# Altium footprint library WR-BHD.PcbLib: 220 footprints (part 5 of 14)
Each footprint in its own frame and in the unit in brackets; x right, y up, seen from the top. Pads: shape width x height; smd on the part's side, far side on the other; paste and mask are expansions set on the pad; w line width, h text height; cw(c..) or ccw(c..) is an arc to the next point about the centre after c.
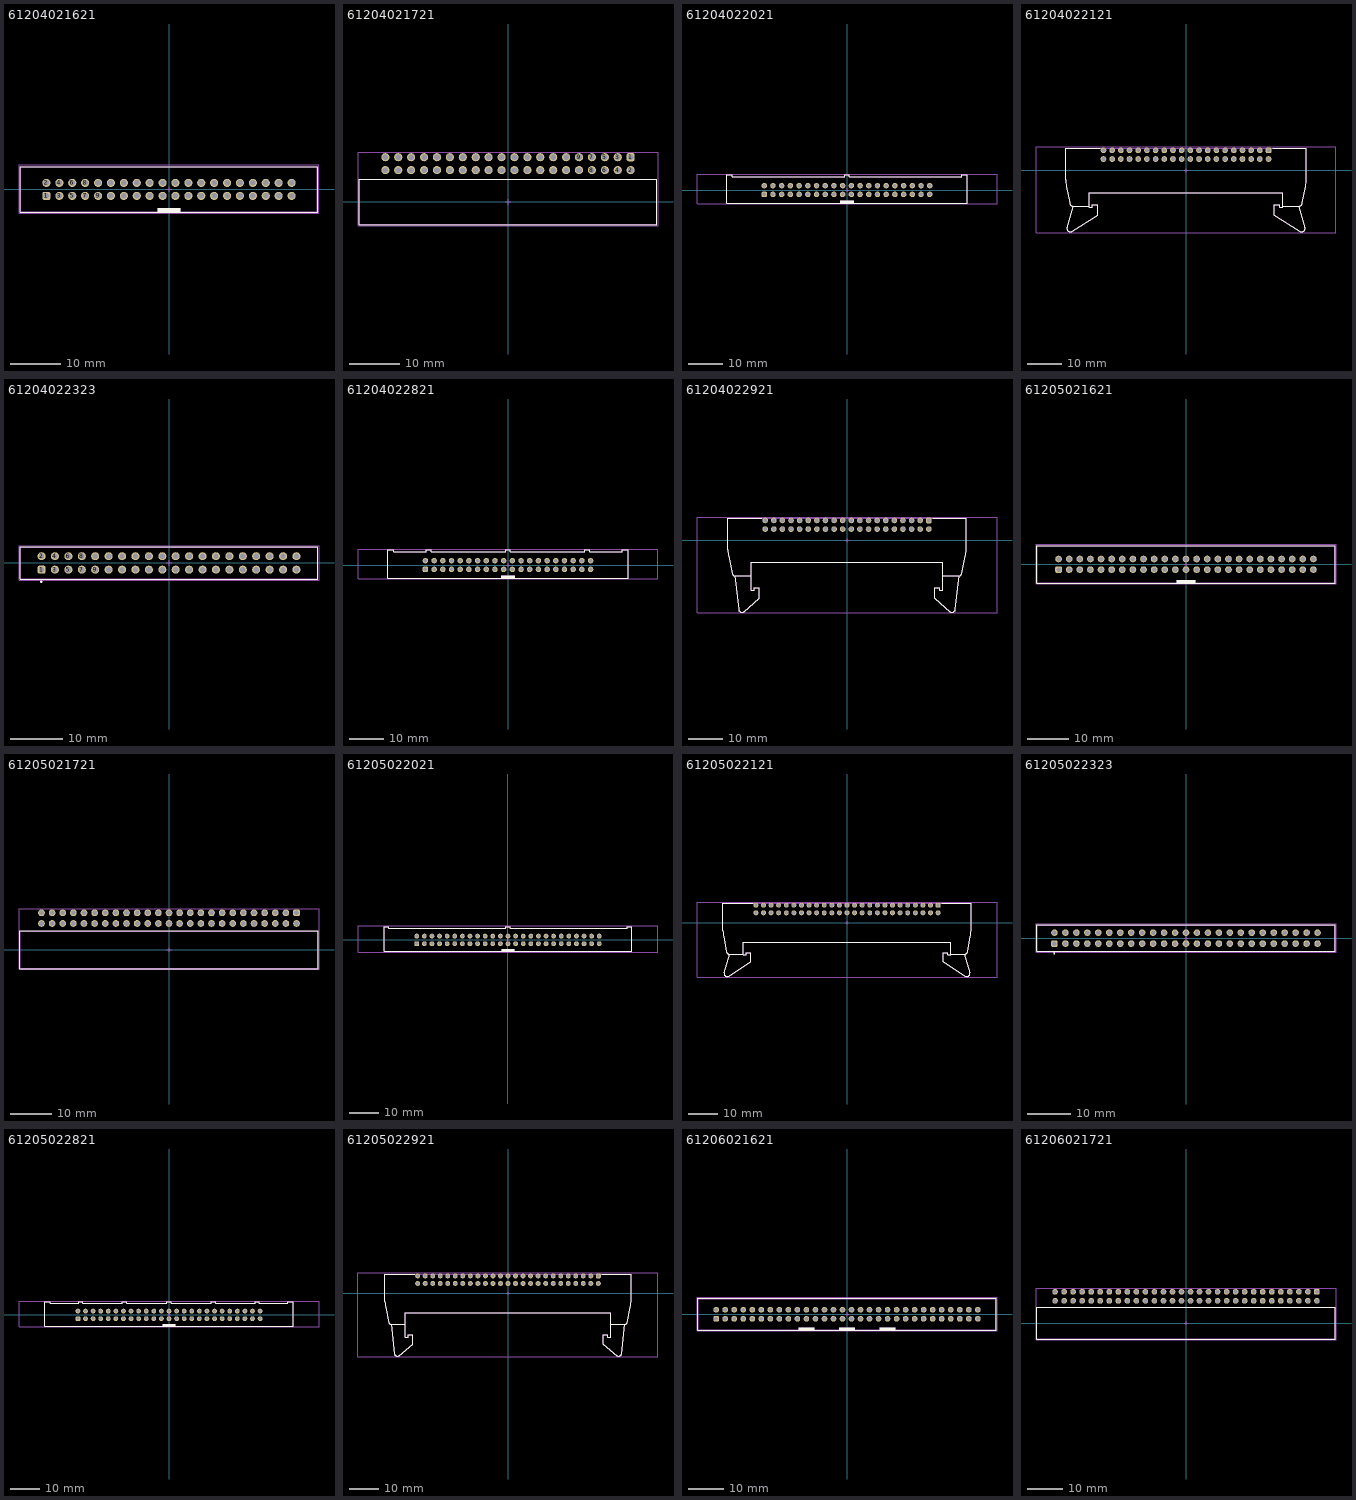
[diagram p4: the footprints below, top view; thin cyan lines are the x and y axes]

## 61204021621 [mm] "40 pins, straight, gold plating"
height 9.1
pads (40):
  rrect50% 1.6x1.6 hole 1.1: 1(-24.13,-1.27)
  round 1.6 hole 1.1: 2(-24.13,1.27) 3(-21.59,-1.27) 4(-21.59,1.27) 5(-19.05,-1.27) 6(-19.05,1.27) 7(-16.51,-1.27) 8(-16.51,1.27) 9(-13.97,-1.27) 10(-13.97,1.27) 11(-11.43,-1.27) 12(-11.43,1.27) 13(-8.89,-1.27) 14(-8.89,1.27) 15(-6.35,-1.27) 16(-6.35,1.27) 17(-3.81,-1.27) 18(-3.81,1.27) 19(-1.27,-1.27) 20(-1.27,1.27) 21(1.27,-1.27) 22(1.27,1.27) 23(3.81,-1.27) 24(3.81,1.27) 25(6.35,-1.27) 26(6.35,1.27) 27(8.89,-1.27) 28(8.89,1.27) 29(11.43,-1.27) 30(11.43,1.27) 31(13.97,-1.27) 32(13.97,1.27) 33(16.51,-1.27) 34(16.51,1.27) 35(19.05,-1.27) 36(19.05,1.27) 37(21.59,-1.27) 38(21.59,1.27) 39(24.13,-1.27) 40(24.13,1.27)
Top Overlay:
  rectangle: -2.25,-4.5 2.25,-3.7
  lines w0.2: -29.33,-4.5 -29.33,4.5 29.33,4.5 29.33,-4.5 -29.33,-4.5
Top Assembly:
  rectangle: -2.25,-4.425 2.25,-3.7
  lines w0.1: -29.23,-4.425 29.23,-4.425 29.23,4.425 -29.23,4.425 -29.23,-4.425
Top Designator:
  text ".Designator" at -3.647,-0.357 h1
Top 3D Body:
  rectangle: -2.25,-4.425 2.25,-3.7
  lines w0.1: -29.23,-4.425 -29.23,4.425 29.23,4.425 29.23,-4.425 -29.23,-4.425
Top Courtyard:
  lines w0.05: -29.53,-4.7 -29.53,4.85 29.53,4.85 29.53,-4.7 -29.53,-4.7
Top Component Center:
  lines w0.1: -0.5,0 0.5,0 ; 0,-0.5 0,0.5
3D body "61204021621.stp": height 9.13, standoff -2.98, extent -29.23,-4.425 29.23,4.75

## 61204021721 [mm] "40 pins, right angled, gold plating"
height 9.1
pads (40):
  rrect50% 1.6x1.6 hole 1.1: 1(24.13,8.805)
  round 1.6 hole 1.1: 2(24.13,6.265) 3(21.59,8.805) 4(21.59,6.265) 5(19.05,8.805) 6(19.05,6.265) 7(16.51,8.805) 8(16.51,6.265) 9(13.97,8.805) 10(13.97,6.265) 11(11.43,8.805) 12(11.43,6.265) 13(8.89,8.805) 14(8.89,6.265) 15(6.35,8.805) 16(6.35,6.265) 17(3.81,8.805) 18(3.81,6.265) 19(1.27,8.805) 20(1.27,6.265) 21(-1.27,8.805) 22(-1.27,6.265) 23(-3.81,8.805) 24(-3.81,6.265) 25(-6.35,8.805) 26(-6.35,6.265) 27(-8.89,8.805) 28(-8.89,6.265) 29(-11.43,8.805) 30(-11.43,6.265) 31(-13.97,8.805) 32(-13.97,6.265) 33(-16.51,8.805) 34(-16.51,6.265) 35(-19.05,8.805) 36(-19.05,6.265) 37(-21.59,8.805) 38(-21.59,6.265) 39(-24.13,8.805) 40(-24.13,6.265)
Top Overlay:
  lines w0.2: -29.305,-4.5 -29.305,4.5 29.305,4.5 29.305,-4.5 -29.305,-4.5
Top Assembly:
  lines w0.1: -29.23,-4.425 -29.23,4.425 29.23,4.425 29.23,-4.425 -29.23,-4.425
Top Designator:
  text ".Designator" at -3.647,-0.357 h1
Top 3D Body:
  lines w0.1: -29.23,-4.425 29.23,-4.425 29.23,4.425 -29.23,4.425 -29.23,-4.425
Top Courtyard:
  lines w0.05: -29.505,-4.7 29.505,-4.7 29.505,9.805 -29.505,9.805 -29.505,-4.7
Top Component Center:
  lines w0.1: -0.5,0 0.5,0 ; 0,-0.5 0,0.5
3D body "61204021721.stp": height 9.23, standoff -2.88, extent -29.23,-4.425 29.23,9.125

## 61204022021 [mm] "40 pins, straight, short lever, gold plating"
height 24.5
pads (40):
  rrect50% 1.6x1.6 hole 1.02: 1(-24.13,-1.27)
  round 1.6 hole 1.02: 2(-24.13,1.27) 3(-21.59,-1.27) 4(-21.59,1.27) 5(-19.05,-1.27) 6(-19.05,1.27) 7(-16.51,-1.27) 8(-16.51,1.27) 9(-13.97,-1.27) 10(-13.97,1.27) 11(-11.43,-1.27) 12(-11.43,1.27) 13(-8.89,-1.27) 14(-8.89,1.27) 15(-6.35,-1.27) 16(-6.35,1.27) 17(-3.81,-1.27) 18(-3.81,1.27) 19(-1.27,-1.27) 20(-1.27,1.27) 21(1.27,-1.27) 22(1.27,1.27) 23(3.81,-1.27) 24(3.81,1.27) 25(6.35,-1.27) 26(6.35,1.27) 27(8.89,-1.27) 28(8.89,1.27) 29(11.43,-1.27) 30(11.43,1.27) 31(13.97,-1.27) 32(13.97,1.27) 33(16.51,-1.27) 34(16.51,1.27) 35(19.05,-1.27) 36(19.05,1.27) 37(21.59,-1.27) 38(21.59,1.27) 39(24.13,-1.27) 40(24.13,1.27)
Top Overlay:
  rectangle: -2.1,-3.85 2.1,-3.05
  lines w0.2: -0.7,4.45 0.7,4.45 0.7,3.85 33.5,3.85 33.5,4.45 35.05,4.45 35.05,-3.85 -35.05,-3.85 -35.05,4.45 -33.5,4.45 -33.5,3.85 -0.7,3.85 -0.7,4.45 ; -0.7,4.45 -0.7,4.45
Top Assembly:
  rectangle: -2.1,-3.85 2.1,-3.05
  lines w0.1: -0.7,4.45 -0.7,3.85 -33.5,3.85 -33.5,4.45 -35.05,4.45 -35.05,-3.85 35.05,-3.85 35.05,4.45 33.5,4.45 33.5,3.85 0.7,3.85 0.7,4.45 -0.7,4.45 ; -0.7,4.45 -0.7,4.45
Top Designator:
  text ".Designator" at -3.647,-0.357 h1
Top 3D Body:
  rectangle: -2.1,-3.85 2.1,-3.05
  lines w0.1: -0.7,4.45 0.7,4.45 0.7,3.85 33.5,3.85 33.5,4.45 35.05,4.45 35.05,-3.85 -35.05,-3.85 -35.05,4.45 -33.5,4.45 -33.5,3.85 -0.7,3.85 -0.7,4.45 ; -0.7,4.45 -0.7,4.45
Top Courtyard:
  lines w0.05: -43.75,-4.05 -43.75,4.65 43.75,4.65 43.75,-4.05 -43.75,-4.05
Top Component Center:
  lines w0.1: -0.5,0 0.5,0 ; 0,-0.5 0,0.5
3D body "61204022021.stp": height 24.55, standoff -3.35, extent -35.15,-3.85 35.15,4.45

## 61204022121 [mm] "40 pins, right angeled, short lever, gold plating"
height 8.3
pads (40):
  rrect50% 1.65x1.65 hole 1.1: 1(24.13,5.88)
  round 1.65 hole 1.1: 2(24.13,3.34) 3(21.59,5.88) 4(21.59,3.34) 5(19.05,5.88) 6(19.05,3.34) 7(16.51,5.88) 8(16.51,3.34) 9(13.97,5.88) 10(13.97,3.34) 11(11.43,5.88) 12(11.43,3.34) 13(8.89,5.88) 14(8.89,3.34) 15(6.35,5.88) 16(6.35,3.34) 17(3.81,5.88) 18(3.81,3.34) 19(1.27,5.88) 20(1.27,3.34) 21(-1.27,5.88) 22(-1.27,3.34) 23(-3.81,5.88) 24(-3.81,3.34) 25(-6.35,5.88) 26(-6.35,3.34) 27(-8.89,5.88) 28(-8.89,3.34) 29(-11.43,5.88) 30(-11.43,3.34) 31(-13.97,5.88) 32(-13.97,3.34) 33(-16.51,5.88) 34(-16.51,3.34) 35(-19.05,5.88) 36(-19.05,3.34) 37(-21.59,5.88) 38(-21.59,3.34) 39(-24.13,5.88) 40(-24.13,3.34)
Top Overlay:
  lines w0.2: -34.014,-9.501 -34.956,-4.611 cw(c-25.15,-2.65) -35.15,-2.65 -35.15,6.5 -25.05,6.5 ; -34.01,-9.5 ccw(c-33.01,-9.5) -33.01,-10.5 ; -33.105,-10.5 -28.35,-10.5 ; -32.924,-10.601 -34.757,-16.691 ccw(c-33.8,-16.98) -33.25,-17.815 -25.85,-13.08 -25.85,-9.98 -27.35,-9.98 -27.35,-10.69 -28.35,-10.69 -28.35,-6.5 28.35,-6.5 28.35,-10.69 27.35,-10.69 27.35,-9.98 25.85,-9.98 25.85,-13.08 33.25,-17.816 ccw(c33.8,-16.98) 34.757,-16.691 32.924,-10.601 ; 25.3,6.5 35.15,6.5 35.15,-2.65 cw(c25.15,-2.65) 34.956,-4.611 34.014,-9.501 ; 28.35,-10.5 33.105,-10.5 ; 33.01,-10.5 ccw(c33.01,-9.5) 34.01,-9.5
Top Assembly:
  lines w0.1: -34.014,-9.501 -34.956,-4.611 cw(c-25.15,-2.65) -35.15,-2.65 -35.15,6.5 35.15,6.5 35.15,-2.65 cw(c25.15,-2.65) 34.956,-4.611 34.014,-9.501 ; -34.01,-9.5 ccw(c-33.01,-9.5) -33.01,-10.5 ; -33.105,-10.5 -28.35,-10.5 ; -32.924,-10.601 -34.757,-16.691 ccw(c-33.8,-16.98) -33.25,-17.815 -25.85,-13.08 -25.85,-9.98 -27.35,-9.98 -27.35,-10.69 -28.35,-10.69 -28.35,-6.5 28.35,-6.5 28.35,-10.69 27.35,-10.69 27.35,-9.98 25.85,-9.98 25.85,-13.08 33.25,-17.816 ccw(c33.8,-16.98) 34.757,-16.691 32.924,-10.601 ; 28.35,-10.5 33.105,-10.5 ; 33.01,-10.5 ccw(c33.01,-9.5) 34.01,-9.5
Top Designator:
  text ".Designator" at -3.647,-0.357 h1
Top 3D Body:
  lines w0.1: -34.014,-9.501 -34.956,-4.611 cw(c-25.15,-2.65) -35.15,-2.65 -35.15,6.5 35.15,6.5 35.15,-2.65 cw(c25.15,-2.65) 34.956,-4.611 34.014,-9.501 ; -34.01,-9.5 ccw(c-33.01,-9.5) -33.01,-10.5 ; -33.105,-10.5 -28.35,-10.5 ; -32.924,-10.601 -34.757,-16.691 ccw(c-33.8,-16.98) -33.25,-17.815 -25.85,-13.08 -25.85,-9.98 -27.35,-9.98 -27.35,-10.69 -28.35,-10.69 -28.35,-6.5 28.35,-6.5 28.35,-10.69 27.35,-10.69 27.35,-9.98 25.85,-9.98 25.85,-13.08 33.25,-17.816 ccw(c33.8,-16.98) 34.757,-16.691 32.924,-10.601 ; 28.35,-10.5 33.105,-10.5 ; 33.01,-10.5 ccw(c33.01,-9.5) 34.01,-9.5
Top Courtyard:
  lines w0.05: -43.85,-18.2 -43.85,6.88 43.85,6.88 43.85,-18.2 -43.85,-18.2
Top Component Center:
  lines w0.1: -0.5,0 0.5,0 ; 0,-0.5 0,0.5
3D body "61204022121.stp": height 8.35, standoff -3.35, extent -35.15,-18 35.15,6.5

## 61204022323 [mm] "40 pins, selective gold plating"
height 7.3
pads (40):
  rrect50% 1.52x1.52 hole 1.02: 1(-24.13,-1.27)
  round 1.52 hole 1.02: 2(-24.13,1.27) 3(-21.59,-1.27) 4(-21.59,1.27) 5(-19.05,-1.27) 6(-19.05,1.27) 7(-16.51,-1.27) 8(-16.51,1.27) 9(-13.97,-1.27) 10(-13.97,1.27) 11(-11.43,-1.27) 12(-11.43,1.27) 13(-8.89,-1.27) 14(-8.89,1.27) 15(-6.35,-1.27) 16(-6.35,1.27) 17(-3.81,-1.27) 18(-3.81,1.27) 19(-1.27,-1.27) 20(-1.27,1.27) 21(1.27,-1.27) 22(1.27,1.27) 23(3.81,-1.27) 24(3.81,1.27) 25(6.35,-1.27) 26(6.35,1.27) 27(8.89,-1.27) 28(8.89,1.27) 29(11.43,-1.27) 30(11.43,1.27) 31(13.97,-1.27) 32(13.97,1.27) 33(16.51,-1.27) 34(16.51,1.27) 35(19.05,-1.27) 36(19.05,1.27) 37(21.59,-1.27) 38(21.59,1.27) 39(24.13,-1.27) 40(24.13,1.27)
Top Overlay:
  circle w0.25: c-24.19,-3.55 r0.125
  lines w0.2: -28.2,-3.075 28.2,-3.075 28.2,3.075 -28.2,3.075 -28.2,-3.075
Top Assembly:
  lines w0.1: -28.125,-3 -28.125,3 28.125,3 28.125,-3 -28.125,-3
Top Designator:
  text ".Designator" at -3.647,-0.357 h1
Top 3D Body:
  lines w0.1: -28.125,-3 28.125,-3 28.125,3 -28.125,3 -28.125,-3
Top Courtyard:
  lines w0.05: -28.4,-3.275 28.4,-3.275 28.4,3.275 -28.4,3.275 -28.4,-3.275
Top Component Center:
  lines w0.1: -0.5,0 0.5,0 ; 0,-0.5 0,0.5
3D body "61204022323.stp": height 9.33, standoff -3.27, extent -28.125,-3 28.125,3

## 61204022821 [mm] "40 pins, straight, long lever, gold plating"
height 28
pads (40):
  rrect50% 1.6x1.6 hole 1.02: 1(-24.13,-1.27)
  round 1.6 hole 1.02: 2(-24.13,1.27) 3(-21.59,-1.27) 4(-21.59,1.27) 5(-19.05,-1.27) 6(-19.05,1.27) 7(-16.51,-1.27) 8(-16.51,1.27) 9(-13.97,-1.27) 10(-13.97,1.27) 11(-11.43,-1.27) 12(-11.43,1.27) 13(-8.89,-1.27) 14(-8.89,1.27) 15(-6.35,-1.27) 16(-6.35,1.27) 17(-3.81,-1.27) 18(-3.81,1.27) 19(-1.27,-1.27) 20(-1.27,1.27) 21(1.27,-1.27) 22(1.27,1.27) 23(3.81,-1.27) 24(3.81,1.27) 25(6.35,-1.27) 26(6.35,1.27) 27(8.89,-1.27) 28(8.89,1.27) 29(11.43,-1.27) 30(11.43,1.27) 31(13.97,-1.27) 32(13.97,1.27) 33(16.51,-1.27) 34(16.51,1.27) 35(19.05,-1.27) 36(19.05,1.27) 37(21.59,-1.27) 38(21.59,1.27) 39(24.13,-1.27) 40(24.13,1.27)
Top Overlay:
  rectangle: -2.1,-3.85 2.1,-3.04
  lines w0.2: -35.15,-3.85 -35.15,4.45 -33.42,4.45 -33.42,3.85 -23.85,3.85 -23.85,4.45 -22.45,4.45 -22.45,3.85 -0.7,3.85 -0.7,4.45 0.7,4.45 0.7,3.85 22.45,3.85 22.45,4.45 23.85,4.45 23.85,3.85 33.42,3.85 33.42,4.45 35.15,4.45 35.15,-3.85 -35.15,-3.85
Top Assembly:
  rectangle: -2.1,-3.85 2.1,-3.04
  lines w0.1: -35.15,-3.85 35.15,-3.85 35.15,4.45 33.42,4.45 33.42,3.85 23.85,3.85 23.85,4.45 22.45,4.45 22.45,3.85 0.7,3.85 0.7,4.45 -0.7,4.45 -0.7,3.85 -22.45,3.85 -22.45,4.45 -23.85,4.45 -23.85,3.85 -33.42,3.85 -33.42,4.45 -35.15,4.45 -35.15,-3.85
Top Designator:
  text ".Designator" at -3.647,-0.357 h1
Top 3D Body:
  rectangle: -2.1,-3.85 2.1,-3.04
  lines w0.1: -35.15,-3.85 -35.15,4.45 -33.42,4.45 -33.42,3.85 -23.85,3.85 -23.85,4.45 -22.45,4.45 -22.45,3.85 -0.7,3.85 -0.7,4.45 0.7,4.45 0.7,3.85 22.45,3.85 22.45,4.45 23.85,4.45 23.85,3.85 33.42,3.85 33.42,4.45 35.15,4.45 35.15,-3.85 -35.15,-3.85
Top Courtyard:
  lines w0.05: -43.85,-4.05 43.85,-4.05 43.85,4.65 -43.85,4.65 -43.85,-4.05
Top Component Center:
  lines w0.1: -0.5,0 0.5,0 ; 0,-0.5 0,0.5
3D body "61204022821 (rev1).stp": height 27.84, standoff -3.35, extent -35.15,-3.86 35.15,4.45

## 61204022921 [mm] "40 pins, right angeled, long lever, gold plating"
height 10.8
pads (40):
  rrect50% 1.65x1.65 hole 1.1: 1(24.13,5.88)
  round 1.65 hole 1.1: 2(24.13,3.34) 3(21.59,5.88) 4(21.59,3.34) 5(19.05,5.88) 6(19.05,3.34) 7(16.51,5.88) 8(16.51,3.34) 9(13.97,5.88) 10(13.97,3.34) 11(11.43,5.88) 12(11.43,3.34) 13(8.89,5.88) 14(8.89,3.34) 15(6.35,5.88) 16(6.35,3.34) 17(3.81,5.88) 18(3.81,3.34) 19(1.27,5.88) 20(1.27,3.34) 21(-1.27,5.88) 22(-1.27,3.34) 23(-3.81,5.88) 24(-3.81,3.34) 25(-6.35,5.88) 26(-6.35,3.34) 27(-8.89,5.88) 28(-8.89,3.34) 29(-11.43,5.88) 30(-11.43,3.34) 31(-13.97,5.88) 32(-13.97,3.34) 33(-16.51,5.88) 34(-16.51,3.34) 35(-19.05,5.88) 36(-19.05,3.34) 37(-21.59,5.88) 38(-21.59,3.34) 39(-24.13,5.88) 40(-24.13,3.34)
Top Overlay:
  lines w0.2: -35.15,-2.81 -35.15,6.5 -25.1,6.5 ; -35.146,-2.81 ccw(c-25.15,-2.51) -34.904,-4.714 -33.859,-9.884 ; -33.854,-9.883 ccw(c-32.93,-9.5) -32.93,-10.5 -28.25,-10.5 ; -33.114,-10.5 -31.968,-20.372 ccw(c-30.98,-20.22) -30.322,-20.973 -25.851,-17.109 ; -25.85,-17.11 -25.85,-14.01 -27.35,-14.01 -27.35,-14.72 -28.25,-14.72 -28.25,-6.5 28.25,-6.5 28.25,-14.72 27.35,-14.72 27.35,-14.01 25.85,-14.01 25.85,-17.11 ; 25.3,6.5 35.15,6.5 35.15,-2.81 ; 25.851,-17.109 30.322,-20.973 ccw(c30.98,-20.22) 31.968,-20.372 33.114,-10.5 ; 28.25,-10.5 32.93,-10.5 ccw(c32.93,-9.5) 33.854,-9.883 ; 33.859,-9.884 34.904,-4.714 ccw(c25.15,-2.51) 35.146,-2.81
Top Assembly:
  lines w0.1: -35.15,-2.81 -35.15,6.5 35.15,6.5 35.15,-2.81 ; -35.146,-2.81 ccw(c-25.15,-2.51) -34.904,-4.714 -33.859,-9.884 ; -33.854,-9.883 ccw(c-32.93,-9.5) -32.93,-10.5 -28.25,-10.5 ; -33.114,-10.5 -31.968,-20.372 ccw(c-30.98,-20.22) -30.322,-20.973 -25.851,-17.109 ; -25.85,-17.11 -25.85,-14.01 -27.35,-14.01 -27.35,-14.72 -28.25,-14.72 -28.25,-6.5 28.25,-6.5 28.25,-14.72 27.35,-14.72 27.35,-14.01 25.85,-14.01 25.85,-17.11 ; 25.851,-17.109 30.322,-20.973 ccw(c30.98,-20.22) 31.968,-20.372 33.114,-10.5 ; 28.25,-10.5 32.93,-10.5 ccw(c32.93,-9.5) 33.854,-9.883 ; 33.859,-9.884 34.904,-4.714 ccw(c25.15,-2.51) 35.146,-2.81
Top Designator:
  text ".Designator" at -3.647,-0.357 h1
Top 3D Body:
  lines w0.1: -35.15,-2.81 -35.15,6.5 35.15,6.5 35.15,-2.81 ; -35.146,-2.81 ccw(c-25.15,-2.51) -34.904,-4.714 -33.859,-9.884 ; -33.854,-9.883 ccw(c-32.93,-9.5) -32.93,-10.5 -28.25,-10.5 ; -33.114,-10.5 -31.968,-20.372 ccw(c-30.98,-20.22) -30.322,-20.973 -25.851,-17.109 ; -25.85,-17.11 -25.85,-14.01 -27.35,-14.01 -27.35,-14.72 -28.25,-14.72 -28.25,-6.5 28.25,-6.5 28.25,-14.72 27.35,-14.72 27.35,-14.01 25.85,-14.01 25.85,-17.11 ; 25.851,-17.109 30.322,-20.973 ccw(c30.98,-20.22) 31.968,-20.372 33.114,-10.5 ; 28.25,-10.5 32.93,-10.5 ccw(c32.93,-9.5) 33.854,-9.883 ; 33.859,-9.884 34.904,-4.714 ccw(c25.15,-2.51) 35.146,-2.81
Top Courtyard:
  lines w0.05: -44.25,-21.41 44.25,-21.41 44.25,6.88 -44.25,6.88 -44.25,-21.41
Top Component Center:
  lines w0.1: -0.5,0 0.5,0 ; 0,-0.5 0,0.5
3D body "61204022921 (rev1).stp": height 8.35, standoff -2.35, extent -35.15,-21.221 35.15,6.5

## 61205021621 [mm] "50 pins, straight, gold plating"
height 9.1
pads (50):
  rrect50% 1.6x1.6 hole 1.1: 1(-30.48,-1.27)
  round 1.6 hole 1.1: 2(-30.48,1.27) 3(-27.94,-1.27) 4(-27.94,1.27) 5(-25.4,-1.27) 6(-25.4,1.27) 7(-22.86,-1.27) 8(-22.86,1.27) 9(-20.32,-1.27) 10(-20.32,1.27) 11(-17.78,-1.27) 12(-17.78,1.27) 13(-15.24,-1.27) 14(-15.24,1.27) 15(-12.7,-1.27) 16(-12.7,1.27) 17(-10.16,-1.27) 18(-10.16,1.27) 19(-7.62,-1.27) 20(-7.62,1.27) 21(-5.08,-1.27) 22(-5.08,1.27) 23(-2.54,-1.27) 24(-2.54,1.27) 25(0,-1.27) 26(0,1.27) 27(2.54,-1.27) 28(2.54,1.27) 29(5.08,-1.27) 30(5.08,1.27) 31(7.62,-1.27) 32(7.62,1.27) 33(10.16,-1.27) 34(10.16,1.27) 35(12.7,-1.27) 36(12.7,1.27) 37(15.24,-1.27) 38(15.24,1.27) 39(17.78,-1.27) 40(17.78,1.27) 41(20.32,-1.27) 42(20.32,1.27) 43(22.86,-1.27) 44(22.86,1.27) 45(25.4,-1.27) 46(25.4,1.27) 47(27.94,-1.27) 48(27.94,1.27) 49(30.48,-1.27) 50(30.48,1.27)
Top Overlay:
  rectangle: -2.25,-4.5 2.25,-3.7
  lines w0.2: -35.68,-4.5 -35.68,4.5 35.68,4.5 35.68,-4.5 -35.68,-4.5
Top Assembly:
  rectangle: -2.25,-4.425 2.25,-3.7
  lines w0.1: -35.58,-4.425 35.58,-4.425 35.58,4.425 -35.58,4.425 -35.58,-4.425
Top Designator:
  text ".Designator" at -3.647,-0.357 h1
Top 3D Body:
  rectangle: -2.25,-4.425 2.25,-3.7
  lines w0.1: -35.58,-4.425 -35.58,4.425 35.58,4.425 35.58,-4.425 -35.58,-4.425
Top Courtyard:
  lines w0.05: -35.88,-4.7 -35.88,4.85 35.88,4.85 35.88,-4.7 -35.88,-4.7
Top Component Center:
  lines w0.1: -0.5,0 0.5,0 ; 0,-0.5 0,0.5
3D body "61205021621.stp": height 9.13, standoff -2.98, extent -35.58,-4.425 35.58,4.75

## 61205021721 [mm] "50 pins, right angled, gold plating"
height 9.1
pads (50):
  rrect50% 1.6x1.6 hole 1.1: 1(30.48,8.805)
  round 1.6 hole 1.1: 2(30.48,6.265) 3(27.94,8.805) 4(27.94,6.265) 5(25.4,8.805) 6(25.4,6.265) 7(22.86,8.805) 8(22.86,6.265) 9(20.32,8.805) 10(20.32,6.265) 11(17.78,8.805) 12(17.78,6.265) 13(15.24,8.805) 14(15.24,6.265) 15(12.7,8.805) 16(12.7,6.265) 17(10.16,8.805) 18(10.16,6.265) 19(7.62,8.805) 20(7.62,6.265) 21(5.08,8.805) 22(5.08,6.265) 23(2.54,8.805) 24(2.54,6.265) 25(0,8.805) 26(0,6.265) 27(-2.54,8.805) 28(-2.54,6.265) 29(-5.08,8.805) 30(-5.08,6.265) 31(-7.62,8.805) 32(-7.62,6.265) 33(-10.16,8.805) 34(-10.16,6.265) 35(-12.7,8.805) 36(-12.7,6.265) 37(-15.24,8.805) 38(-15.24,6.265) 39(-17.78,8.805) 40(-17.78,6.265) 41(-20.32,8.805) 42(-20.32,6.265) 43(-22.86,8.805) 44(-22.86,6.265) 45(-25.4,8.805) 46(-25.4,6.265) 47(-27.94,8.805) 48(-27.94,6.265) 49(-30.48,8.805) 50(-30.48,6.265)
Top Overlay:
  lines w0.2: -35.655,-4.5 35.655,-4.5 35.655,4.5 -35.655,4.5 -35.655,-4.5
Top Assembly:
  lines w0.1: -35.58,-4.425 35.58,-4.425 35.58,4.425 -35.58,4.425 -35.58,-4.425
Top Designator:
  text ".Designator" at -3.647,-0.357 h1
Top 3D Body:
  lines w0.1: -35.58,-4.425 -35.58,4.425 35.58,4.425 35.58,-4.425 -35.58,-4.425
Top Courtyard:
  lines w0.05: -35.855,-4.7 -35.855,9.805 35.855,9.805 35.855,-4.7 -35.855,-4.7
Top Component Center:
  lines w0.1: -0.5,0 0.5,0 ; 0,-0.5 0,0.5
3D body "61205021721.stp": height 9.23, standoff -2.88, extent -35.58,-4.425 35.58,9.125

## 61205022021 [mm] "50 pins, straight, short lever, gold plating"
height 24.5
pads (50):
  rrect50% 1.6x1.6 hole 1.02: 1(-30.48,-1.27)
  round 1.6 hole 1.02: 2(-30.48,1.27) 3(-27.94,-1.27) 4(-27.94,1.27) 5(-25.4,-1.27) 6(-25.4,1.27) 7(-22.86,-1.27) 8(-22.86,1.27) 9(-20.32,-1.27) 10(-20.32,1.27) 11(-17.78,-1.27) 12(-17.78,1.27) 13(-15.24,-1.27) 14(-15.24,1.27) 15(-12.7,-1.27) 16(-12.7,1.27) 17(-10.16,-1.27) 18(-10.16,1.27) 19(-7.62,-1.27) 20(-7.62,1.27) 21(-5.08,-1.27) 22(-5.08,1.27) 23(-2.54,-1.27) 24(-2.54,1.27) 25(0,-1.27) 26(0,1.27) 27(2.54,-1.27) 28(2.54,1.27) 29(5.08,-1.27) 30(5.08,1.27) 31(7.62,-1.27) 32(7.62,1.27) 33(10.16,-1.27) 34(10.16,1.27) 35(12.7,-1.27) 36(12.7,1.27) 37(15.24,-1.27) 38(15.24,1.27) 39(17.78,-1.27) 40(17.78,1.27) 41(20.32,-1.27) 42(20.32,1.27) 43(22.86,-1.27) 44(22.86,1.27) 45(25.4,-1.27) 46(25.4,1.27) 47(27.94,-1.27) 48(27.94,1.27) 49(30.48,-1.27) 50(30.48,1.27)
Top Overlay:
  rectangle: -2.1,-3.85 2.1,-3.05
  lines w0.2: -0.7,4.45 0.7,4.45 0.7,3.85 39.85,3.85 39.85,4.45 41.4,4.45 41.4,-3.85 -41.4,-3.85 -41.4,4.45 -39.85,4.45 -39.85,3.85 -0.7,3.85 -0.7,4.45 ; -0.7,4.45 -0.7,4.45
Top Assembly:
  rectangle: -2.1,-3.85 2.1,-3.05
  lines w0.1: -0.7,4.45 -0.7,3.85 -39.85,3.85 -39.85,4.45 -41.4,4.45 -41.4,-3.85 41.4,-3.85 41.4,4.45 39.85,4.45 39.85,3.85 0.7,3.85 0.7,4.45 -0.7,4.45 ; -0.7,4.45 -0.7,4.45
Top Designator:
  text ".Designator" at -3.647,-0.357 h1
Top 3D Body:
  rectangle: -2.1,-3.85 2.1,-3.05
  lines w0.1: -0.7,4.45 0.7,4.45 0.7,3.85 39.85,3.85 39.85,4.45 41.4,4.45 41.4,-3.85 -41.4,-3.85 -41.4,4.45 -39.85,4.45 -39.85,3.85 -0.7,3.85 -0.7,4.45 ; -0.7,4.45 -0.7,4.45
Top Courtyard:
  lines w0.05: -50.1,-4.05 -50.1,4.65 50.1,4.65 50.1,-4.05 -50.1,-4.05
Top Component Center:
  lines w0.1: -0.5,0 0.5,0 ; 0,-0.5 0,0.5
3D body "61205022021.stp": height 24.55, standoff -3.35, extent -41.5,-3.85 41.5,4.45

## 61205022121 [mm] "50 pins, right angeled, short lever, gold plating"
height 8.3
pads (50):
  rrect50% 1.65x1.65 hole 1.1: 1(30.48,5.88)
  round 1.65 hole 1.1: 2(30.48,3.34) 3(27.94,5.88) 4(27.94,3.34) 5(25.4,5.88) 6(25.4,3.34) 7(22.86,5.88) 8(22.86,3.34) 9(20.32,5.88) 10(20.32,3.34) 11(17.78,5.88) 12(17.78,3.34) 13(15.24,5.88) 14(15.24,3.34) 15(12.7,5.88) 16(12.7,3.34) 17(10.16,5.88) 18(10.16,3.34) 19(7.62,5.88) 20(7.62,3.34) 21(5.08,5.88) 22(5.08,3.34) 23(2.54,5.88) 24(2.54,3.34) 25(0,5.88) 26(0,3.34) 27(-2.54,5.88) 28(-2.54,3.34) 29(-5.08,5.88) 30(-5.08,3.34) 31(-7.62,5.88) 32(-7.62,3.34) 33(-10.16,5.88) 34(-10.16,3.34) 35(-12.7,5.88) 36(-12.7,3.34) 37(-15.24,5.88) 38(-15.24,3.34) 39(-17.78,5.88) 40(-17.78,3.34) 41(-20.32,5.88) 42(-20.32,3.34) 43(-22.86,5.88) 44(-22.86,3.34) 45(-25.4,5.88) 46(-25.4,3.34) 47(-27.94,5.88) 48(-27.94,3.34) 49(-30.48,5.88) 50(-30.48,3.34)
Top Overlay:
  lines w0.2: -40.364,-9.501 -41.306,-4.611 cw(c-31.5,-2.65) -41.5,-2.65 -41.5,6.5 -31.4,6.5 ; -40.36,-9.5 ccw(c-39.36,-9.5) -39.36,-10.5 ; -39.455,-10.5 -34.7,-10.5 ; -39.274,-10.601 -41.107,-16.691 ccw(c-40.15,-16.98) -39.6,-17.815 -32.2,-13.08 -32.2,-9.98 -33.7,-9.98 -33.7,-10.69 -34.7,-10.69 -34.7,-6.5 34.7,-6.5 34.7,-10.69 33.7,-10.69 33.7,-9.98 32.2,-9.98 32.2,-13.08 39.6,-17.816 ccw(c40.15,-16.98) 41.107,-16.691 39.274,-10.601 ; 31.65,6.5 41.5,6.5 41.5,-2.65 cw(c31.5,-2.65) 41.306,-4.611 40.364,-9.501 ; 34.7,-10.5 39.455,-10.5 ; 39.36,-10.5 ccw(c39.36,-9.5) 40.36,-9.5
Top Assembly:
  lines w0.1: -40.364,-9.501 -41.306,-4.611 cw(c-31.5,-2.65) -41.5,-2.65 -41.5,6.5 41.5,6.5 41.5,-2.65 cw(c31.5,-2.65) 41.306,-4.611 40.364,-9.501 ; -40.36,-9.5 ccw(c-39.36,-9.5) -39.36,-10.5 ; -39.455,-10.5 -34.7,-10.5 ; -39.274,-10.601 -41.107,-16.691 ccw(c-40.15,-16.98) -39.6,-17.815 -32.2,-13.08 -32.2,-9.98 -33.7,-9.98 -33.7,-10.69 -34.7,-10.69 -34.7,-6.5 34.7,-6.5 34.7,-10.69 33.7,-10.69 33.7,-9.98 32.2,-9.98 32.2,-13.08 39.6,-17.816 ccw(c40.15,-16.98) 41.107,-16.691 39.274,-10.601 ; 34.7,-10.5 39.455,-10.5 ; 39.36,-10.5 ccw(c39.36,-9.5) 40.36,-9.5
Top Designator:
  text ".Designator" at -3.647,-0.357 h1
Top 3D Body:
  lines w0.1: -40.364,-9.501 -41.306,-4.611 cw(c-31.5,-2.65) -41.5,-2.65 -41.5,6.5 41.5,6.5 41.5,-2.65 cw(c31.5,-2.65) 41.306,-4.611 40.364,-9.501 ; -40.36,-9.5 ccw(c-39.36,-9.5) -39.36,-10.5 ; -39.455,-10.5 -34.7,-10.5 ; -39.274,-10.601 -41.107,-16.691 ccw(c-40.15,-16.98) -39.6,-17.815 -32.2,-13.08 -32.2,-9.98 -33.7,-9.98 -33.7,-10.69 -34.7,-10.69 -34.7,-6.5 34.7,-6.5 34.7,-10.69 33.7,-10.69 33.7,-9.98 32.2,-9.98 32.2,-13.08 39.6,-17.816 ccw(c40.15,-16.98) 41.107,-16.691 39.274,-10.601 ; 34.7,-10.5 39.455,-10.5 ; 39.36,-10.5 ccw(c39.36,-9.5) 40.36,-9.5
Top Courtyard:
  lines w0.05: -50.2,-18.2 50.2,-18.2 50.2,6.88 -50.2,6.88 -50.2,-18.2
Top Component Center:
  lines w0.1: -0.5,0 0.5,0 ; 0,-0.5 0,0.5
3D body "61205022121.stp": height 8.35, standoff -3.35, extent -41.5,-18 41.5,6.5

## 61205022323 [mm] "50 pins, selective gold plating"
height 7.3
pads (50):
  rrect50% 1.52x1.52 hole 1.02: 1(-30.48,-1.27)
  round 1.52 hole 1.02: 2(-30.48,1.27) 3(-27.94,-1.27) 4(-27.94,1.27) 5(-25.4,-1.27) 6(-25.4,1.27) 7(-22.86,-1.27) 8(-22.86,1.27) 9(-20.32,-1.27) 10(-20.32,1.27) 11(-17.78,-1.27) 12(-17.78,1.27) 13(-15.24,-1.27) 14(-15.24,1.27) 15(-12.7,-1.27) 16(-12.7,1.27) 17(-10.16,-1.27) 18(-10.16,1.27) 19(-7.62,-1.27) 20(-7.62,1.27) 21(-5.08,-1.27) 22(-5.08,1.27) 23(-2.54,-1.27) 24(-2.54,1.27) 25(0,-1.27) 26(0,1.27) 27(2.54,-1.27) 28(2.54,1.27) 29(5.08,-1.27) 30(5.08,1.27) 31(7.62,-1.27) 32(7.62,1.27) 33(10.16,-1.27) 34(10.16,1.27) 35(12.7,-1.27) 36(12.7,1.27) 37(15.24,-1.27) 38(15.24,1.27) 39(17.78,-1.27) 40(17.78,1.27) 41(20.32,-1.27) 42(20.32,1.27) 43(22.86,-1.27) 44(22.86,1.27) 45(25.4,-1.27) 46(25.4,1.27) 47(27.94,-1.27) 48(27.94,1.27) 49(30.48,-1.27) 50(30.48,1.27)
Top Overlay:
  circle w0.25: c-30.54,-3.55 r0.125
  lines w0.2: -34.55,-3.075 -34.55,3.075 34.55,3.075 34.55,-3.075 -34.55,-3.075
Top Assembly:
  lines w0.1: -34.475,-3 34.475,-3 34.475,3 -34.475,3 -34.475,-3
Top Designator:
  text ".Designator" at -3.647,-0.357 h1
Top 3D Body:
  lines w0.1: -34.475,-3 -34.475,3 34.475,3 34.475,-3 -34.475,-3
Top Courtyard:
  lines w0.05: -34.75,-3.275 -34.75,3.275 34.75,3.275 34.75,-3.275 -34.75,-3.275
Top Component Center:
  lines w0.1: -0.5,0 0.5,0 ; 0,-0.5 0,0.5
3D body "61205022323.stp": height 9.33, standoff -3.27, extent -34.475,-3 34.475,3

## 61205022821 [mm] "50 pins, straight, long lever, gold plating"
height 28
pads (50):
  rrect50% 1.6x1.6 hole 1.02: 1(-30.48,-1.27)
  round 1.6 hole 1.02: 2(-30.48,1.27) 3(-27.94,-1.27) 4(-27.94,1.27) 5(-25.4,-1.27) 6(-25.4,1.27) 7(-22.86,-1.27) 8(-22.86,1.27) 9(-20.32,-1.27) 10(-20.32,1.27) 11(-17.78,-1.27) 12(-17.78,1.27) 13(-15.24,-1.27) 14(-15.24,1.27) 15(-12.7,-1.27) 16(-12.7,1.27) 17(-10.16,-1.27) 18(-10.16,1.27) 19(-7.62,-1.27) 20(-7.62,1.27) 21(-5.08,-1.27) 22(-5.08,1.27) 23(-2.54,-1.27) 24(-2.54,1.27) 25(0,-1.27) 26(0,1.27) 27(2.54,-1.27) 28(2.54,1.27) 29(5.08,-1.27) 30(5.08,1.27) 31(7.62,-1.27) 32(7.62,1.27) 33(10.16,-1.27) 34(10.16,1.27) 35(12.7,-1.27) 36(12.7,1.27) 37(15.24,-1.27) 38(15.24,1.27) 39(17.78,-1.27) 40(17.78,1.27) 41(20.32,-1.27) 42(20.32,1.27) 43(22.86,-1.27) 44(22.86,1.27) 45(25.4,-1.27) 46(25.4,1.27) 47(27.94,-1.27) 48(27.94,1.27) 49(30.48,-1.27) 50(30.48,1.27)
Top Overlay:
  rectangle: -2.1,-3.85 2.1,-3.04
  lines w0.2: -41.5,-3.85 41.5,-3.85 41.5,4.45 39.77,4.45 39.77,3.85 30.2,3.85 30.2,4.45 28.8,4.45 28.8,3.85 15.6,3.85 15.6,4.45 14.2,4.45 14.2,3.85 0.7,3.85 0.7,4.45 -0.7,4.45 -0.7,3.85 -14.2,3.85 -14.2,4.45 -15.6,4.45 -15.6,3.85 -28.8,3.85 -28.8,4.45 -30.2,4.45 -30.2,3.85 -39.77,3.85 -39.77,4.45 -41.5,4.45 -41.5,-3.85
Top Assembly:
  rectangle: -2.1,-3.85 2.1,-3.04
  lines w0.1: -41.5,-3.85 -41.5,4.45 -39.77,4.45 -39.77,3.85 -30.2,3.85 -30.2,4.45 -28.8,4.45 -28.8,3.85 -15.6,3.85 -15.6,4.45 -14.2,4.45 -14.2,3.85 -0.7,3.85 -0.7,4.45 0.7,4.45 0.7,3.85 14.2,3.85 14.2,4.45 15.6,4.45 15.6,3.85 28.8,3.85 28.8,4.45 30.2,4.45 30.2,3.85 39.77,3.85 39.77,4.45 41.5,4.45 41.5,-3.85 -41.5,-3.85
Top Designator:
  text ".Designator" at -3.647,-0.357 h1
Top 3D Body:
  rectangle: -2.1,-3.85 2.1,-3.04
  lines w0.1: -41.5,-3.85 41.5,-3.85 41.5,4.45 39.77,4.45 39.77,3.85 30.2,3.85 30.2,4.45 28.8,4.45 28.8,3.85 15.6,3.85 15.6,4.45 14.2,4.45 14.2,3.85 0.7,3.85 0.7,4.45 -0.7,4.45 -0.7,3.85 -14.2,3.85 -14.2,4.45 -15.6,4.45 -15.6,3.85 -28.8,3.85 -28.8,4.45 -30.2,4.45 -30.2,3.85 -39.77,3.85 -39.77,4.45 -41.5,4.45 -41.5,-3.85
Top Courtyard:
  lines w0.05: -50.2,-4.05 -50.2,4.65 50.2,4.65 50.2,-4.05 -50.2,-4.05
Top Component Center:
  lines w0.1: -0.5,0 0.5,0 ; 0,-0.5 0,0.5
3D body "61205022821 (rev1).stp": height 27.84, standoff -3.35, extent -41.5,-3.86 41.5,4.45

## 61205022921 [mm] "50 pins, right angeled, long lever, gold plating"
height 10.8
pads (50):
  rrect50% 1.65x1.65 hole 1.1: 1(30.48,5.88)
  round 1.65 hole 1.1: 2(30.48,3.34) 3(27.94,5.88) 4(27.94,3.34) 5(25.4,5.88) 6(25.4,3.34) 7(22.86,5.88) 8(22.86,3.34) 9(20.32,5.88) 10(20.32,3.34) 11(17.78,5.88) 12(17.78,3.34) 13(15.24,5.88) 14(15.24,3.34) 15(12.7,5.88) 16(12.7,3.34) 17(10.16,5.88) 18(10.16,3.34) 19(7.62,5.88) 20(7.62,3.34) 21(5.08,5.88) 22(5.08,3.34) 23(2.54,5.88) 24(2.54,3.34) 25(0,5.88) 26(0,3.34) 27(-2.54,5.88) 28(-2.54,3.34) 29(-5.08,5.88) 30(-5.08,3.34) 31(-7.62,5.88) 32(-7.62,3.34) 33(-10.16,5.88) 34(-10.16,3.34) 35(-12.7,5.88) 36(-12.7,3.34) 37(-15.24,5.88) 38(-15.24,3.34) 39(-17.78,5.88) 40(-17.78,3.34) 41(-20.32,5.88) 42(-20.32,3.34) 43(-22.86,5.88) 44(-22.86,3.34) 45(-25.4,5.88) 46(-25.4,3.34) 47(-27.94,5.88) 48(-27.94,3.34) 49(-30.48,5.88) 50(-30.48,3.34)
Top Overlay:
  lines w0.2: -41.5,-2.81 -41.5,6.5 -31.45,6.5 ; -41.496,-2.81 ccw(c-31.5,-2.51) -41.254,-4.714 -40.209,-9.884 ; -40.204,-9.883 ccw(c-39.28,-9.5) -39.28,-10.5 -34.6,-10.5 ; -39.464,-10.5 -38.318,-20.372 ccw(c-37.33,-20.22) -36.672,-20.973 -32.201,-17.109 ; -32.2,-17.11 -32.2,-14.01 -33.7,-14.01 -33.7,-14.72 -34.6,-14.72 -34.6,-6.5 34.6,-6.5 34.6,-14.72 33.7,-14.72 33.7,-14.01 32.2,-14.01 32.2,-17.11 ; 31.65,6.5 41.5,6.5 41.5,-2.81 ; 32.201,-17.109 36.672,-20.973 ccw(c37.33,-20.22) 38.318,-20.372 39.464,-10.5 ; 34.6,-10.5 39.28,-10.5 ccw(c39.28,-9.5) 40.204,-9.883 ; 40.209,-9.884 41.254,-4.714 ccw(c31.5,-2.51) 41.496,-2.81
Top Assembly:
  lines w0.1: -41.5,-2.81 -41.5,6.5 41.5,6.5 41.5,-2.81 ; -41.496,-2.81 ccw(c-31.5,-2.51) -41.254,-4.714 -40.209,-9.884 ; -40.204,-9.883 ccw(c-39.28,-9.5) -39.28,-10.5 -34.6,-10.5 ; -39.464,-10.5 -38.318,-20.372 ccw(c-37.33,-20.22) -36.672,-20.973 -32.201,-17.109 ; -32.2,-17.11 -32.2,-14.01 -33.7,-14.01 -33.7,-14.72 -34.6,-14.72 -34.6,-6.5 34.6,-6.5 34.6,-14.72 33.7,-14.72 33.7,-14.01 32.2,-14.01 32.2,-17.11 ; 32.201,-17.109 36.672,-20.973 ccw(c37.33,-20.22) 38.318,-20.372 39.464,-10.5 ; 34.6,-10.5 39.28,-10.5 ccw(c39.28,-9.5) 40.204,-9.883 ; 40.209,-9.884 41.254,-4.714 ccw(c31.5,-2.51) 41.496,-2.81
Top Designator:
  text ".Designator" at -3.647,-0.357 h1
Top 3D Body:
  lines w0.1: -41.5,-2.81 -41.5,6.5 41.5,6.5 41.5,-2.81 ; -41.496,-2.81 ccw(c-31.5,-2.51) -41.254,-4.714 -40.209,-9.884 ; -40.204,-9.883 ccw(c-39.28,-9.5) -39.28,-10.5 -34.6,-10.5 ; -39.464,-10.5 -38.318,-20.372 ccw(c-37.33,-20.22) -36.672,-20.973 -32.201,-17.109 ; -32.2,-17.11 -32.2,-14.01 -33.7,-14.01 -33.7,-14.72 -34.6,-14.72 -34.6,-6.5 34.6,-6.5 34.6,-14.72 33.7,-14.72 33.7,-14.01 32.2,-14.01 32.2,-17.11 ; 32.201,-17.109 36.672,-20.973 ccw(c37.33,-20.22) 38.318,-20.372 39.464,-10.5 ; 34.6,-10.5 39.28,-10.5 ccw(c39.28,-9.5) 40.204,-9.883 ; 40.209,-9.884 41.254,-4.714 ccw(c31.5,-2.51) 41.496,-2.81
Top Courtyard:
  lines w0.05: -50.6,-21.41 50.6,-21.41 50.6,6.88 -50.6,6.88 -50.6,-21.41
Top Component Center:
  lines w0.1: -0.5,0 0.5,0 ; 0,-0.5 0,0.5
3D body "61205022921 (rev1).stp": height 8.35, standoff -2.35, extent -41.5,-21.221 41.5,6.5

## 61206021621 [mm] "60 pins, straight, gold plating"
height 9.1
pads (60):
  rrect50% 1.6x1.6 hole 1.1: 1(-36.83,-1.27)
  round 1.6 hole 1.1: 2(-36.83,1.27) 3(-34.29,-1.27) 4(-34.29,1.27) 5(-31.75,-1.27) 6(-31.75,1.27) 7(-29.21,-1.27) 8(-29.21,1.27) 9(-26.67,-1.27) 10(-26.67,1.27) 11(-24.13,-1.27) 12(-24.13,1.27) 13(-21.59,-1.27) 14(-21.59,1.27) 15(-19.05,-1.27) 16(-19.05,1.27) 17(-16.51,-1.27) 18(-16.51,1.27) 19(-13.97,-1.27) 20(-13.97,1.27) 21(-11.43,-1.27) 22(-11.43,1.27) 23(-8.89,-1.27) 24(-8.89,1.27) 25(-6.35,-1.27) 26(-6.35,1.27) 27(-3.81,-1.27) 28(-3.81,1.27) 29(-1.27,-1.27) 30(-1.27,1.27) 31(1.27,-1.27) 32(1.27,1.27) 33(3.81,-1.27) 34(3.81,1.27) 35(6.35,-1.27) 36(6.35,1.27) 37(8.89,-1.27) 38(8.89,1.27) 39(11.43,-1.27) 40(11.43,1.27) 41(13.97,-1.27) 42(13.97,1.27) 43(16.51,-1.27) 44(16.51,1.27) 45(19.05,-1.27) 46(19.05,1.27) 47(21.59,-1.27) 48(21.59,1.27) 49(24.13,-1.27) 50(24.13,1.27) 51(26.67,-1.27) 52(26.67,1.27) 53(29.21,-1.27) 54(29.21,1.27) 55(31.75,-1.27) 56(31.75,1.27) 57(34.29,-1.27) 58(34.29,1.27) 59(36.83,-1.27) 60(36.83,1.27)
Top Overlay:
  rectangle: -2.25,-4.5 2.25,-3.7
  rectangle: -13.68,-4.5 -9.18,-3.7
  rectangle: 9.18,-4.5 13.68,-3.7
  lines w0.2: -42.03,-4.5 -42.03,4.5 42.03,4.5 42.03,-4.5 -42.03,-4.5
Top Assembly:
  rectangle: -2.25,-4.425 2.25,-3.7
  rectangle: -13.68,-4.425 -9.18,-3.7
  rectangle: 9.18,-4.425 13.68,-3.7
  lines w0.1: -41.93,-4.425 41.93,-4.425 41.93,4.425 -41.93,4.425 -41.93,-4.425
Top Designator:
  text ".Designator" at -3.647,-0.357 h1
Top 3D Body:
  rectangle: 9.18,-4.425 13.68,-3.7
  rectangle: -13.68,-4.425 -9.18,-3.7
  rectangle: -2.25,-4.425 2.25,-3.7
  lines w0.1: -41.93,-4.425 -41.93,4.425 41.93,4.425 41.93,-4.425 -41.93,-4.425
Top Courtyard:
  lines w0.05: -42.23,-4.7 -42.23,4.85 42.23,4.85 42.23,-4.7 -42.23,-4.7
Top Component Center:
  lines w0.1: -0.5,0 0.5,0 ; 0,-0.5 0,0.5
3D body "61206021621.stp": height 9.13, standoff -2.98, extent -41.93,-4.425 41.93,4.75

## 61206021721 [mm] "60 pins, right angled, gold plating"
height 9.1
pads (60):
  rrect50% 1.6x1.6 hole 1.1: 1(36.83,8.805)
  round 1.6 hole 1.1: 2(36.83,6.265) 3(34.29,8.805) 4(34.29,6.265) 5(31.75,8.805) 6(31.75,6.265) 7(29.21,8.805) 8(29.21,6.265) 9(26.67,8.805) 10(26.67,6.265) 11(24.13,8.805) 12(24.13,6.265) 13(21.59,8.805) 14(21.59,6.265) 15(19.05,8.805) 16(19.05,6.265) 17(16.51,8.805) 18(16.51,6.265) 19(13.97,8.805) 20(13.97,6.265) 21(11.43,8.805) 22(11.43,6.265) 23(8.89,8.805) 24(8.89,6.265) 25(6.35,8.805) 26(6.35,6.265) 27(3.81,8.805) 28(3.81,6.265) 29(1.27,8.805) 30(1.27,6.265) 31(-1.27,8.805) 32(-1.27,6.265) 33(-3.81,8.805) 34(-3.81,6.265) 35(-6.35,8.805) 36(-6.35,6.265) 37(-8.89,8.805) 38(-8.89,6.265) 39(-11.43,8.805) 40(-11.43,6.265) 41(-13.97,8.805) 42(-13.97,6.265) 43(-16.51,8.805) 44(-16.51,6.265) 45(-19.05,8.805) 46(-19.05,6.265) 47(-21.59,8.805) 48(-21.59,6.265) 49(-24.13,8.805) 50(-24.13,6.265) 51(-26.67,8.805) 52(-26.67,6.265) 53(-29.21,8.805) 54(-29.21,6.265) 55(-31.75,8.805) 56(-31.75,6.265) 57(-34.29,8.805) 58(-34.29,6.265) 59(-36.83,8.805) 60(-36.83,6.265)
Top Overlay:
  lines w0.2: -42.005,-4.5 42.005,-4.5 42.005,4.5 -42.005,4.5 -42.005,-4.5
Top Assembly:
  lines w0.1: -41.93,-4.425 41.93,-4.425 41.93,4.425 -41.93,4.425 -41.93,-4.425
Top Designator:
  text ".Designator" at -3.647,-0.357 h1
Top 3D Body:
  lines w0.1: -41.93,-4.425 -41.93,4.425 41.93,4.425 41.93,-4.425 -41.93,-4.425
Top Courtyard:
  lines w0.05: -42.205,-4.7 -42.205,9.805 42.205,9.805 42.205,-4.7 -42.205,-4.7
Top Component Center:
  lines w0.1: -0.5,0 0.5,0 ; 0,-0.5 0,0.5
3D body "61206021721.stp": height 9.23, standoff -2.88, extent -41.93,-4.425 41.93,9.125